# Altium footprint library EMX4T2R.PcbLib: 3 footprints
Each footprint in its own frame and in the unit in brackets; x right, y up, seen from the top. Pads: shape width x height; smd on the part's side, far side on the other; paste and mask are expansions set on the pad; w line width, h text height; cw(c..) or ccw(c..) is an arc to the next point about the centre after c.
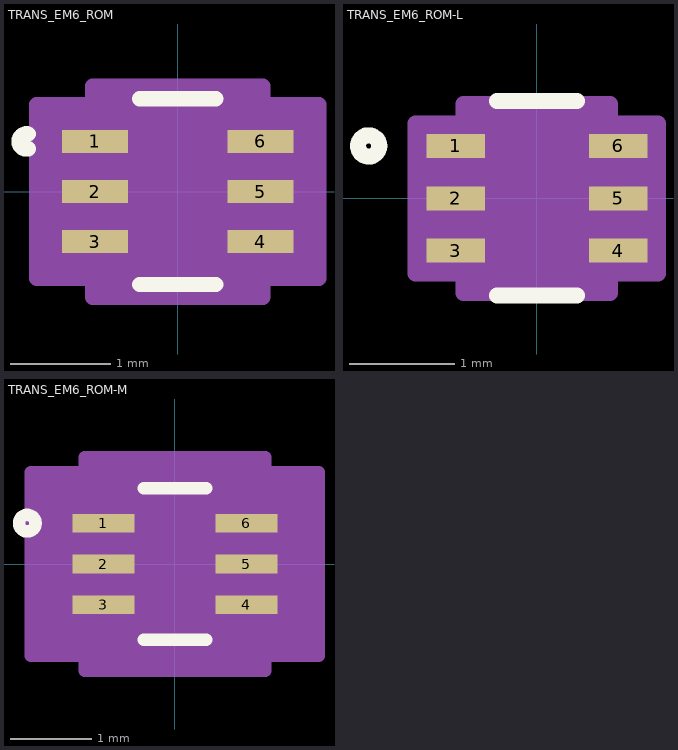
[diagram p0: the footprints below, top view; thin cyan lines are the x and y axes]

## TRANS_EM6_ROM [mil]
pads (6):
  rect 26x9 smd paste+0 mask+0: 1(-32.5,19.68) 2(-32.5,0) 3(-32.5,-19.68) 4(32.5,-19.68) 5(32.5,0) 6(32.5,19.68)
Top Overlay:
  lines w6: -58.6,16.78 cw(c-59.34,19.68) -58.6,22.59 ; -15.03,-36.5 15.03,-36.5 ; -15.03,36.5 15.03,36.5
Mechanical 13:
  lines w1: -12,31.5 ccw(c0,31.5) 12,31.5 ; -23.5,-31.5 -23.5,31.5 23.5,31.5 23.5,-31.5 -23.5,-31.5
Mechanical 15:
  region: -33.5,-34.19 -55.5,-34.19 -55.5,34.19 -33.5,34.19 -33.5,41.5 33.5,41.5 33.5,34.19 55.5,34.19 55.5,-34.19 33.5,-34.19 33.5,-41.5 -33.5,-41.5
  lines w6: -55.5,-34.19 -33.5,-34.19 -33.5,-41.5 33.5,-41.5 33.5,-34.19 55.5,-34.19 55.5,34.19 33.5,34.19 33.5,41.5 -33.5,41.5 -33.5,34.19 -55.5,34.19 -55.5,-34.19
3D body "TRANS_EM6_ROM.step": height 22.09, standoff 0, extent -33.5,-31.5 33.5,31.5

## TRANS_EM6_ROM-L [mil]
pads (6):
  rect 22x9 smd paste+0 mask+0: 1(-30.5,19.68) 2(-30.5,0) 3(-30.5,-19.68) 4(30.5,-19.68) 5(30.5,0) 6(30.5,19.68)
Top Overlay:
  circle w6: c-63.19,19.68 r4
  lines w6: -15.03,-36.5 15.03,-36.5 ; -15.03,36.5 15.03,36.5
  text ".Designator" at -137.5,-25 h50
Mechanical 13:
  circle w1: c-19.5,19.68 r3
  lines w1: -12,31.5 ccw(c0,31.5) 12,31.5 ; -23.5,-31.5 23.5,-31.5 23.5,31.5 -23.5,31.5 -23.5,-31.5
  text ".Designator" at -137.5,-25 h50
Mechanical 15:
  region: -27.5,-28.18 -45.5,-28.18 -45.5,28.18 -27.5,28.18 -27.5,35.5 27.5,35.5 27.5,28.18 45.5,28.18 45.5,-28.18 27.5,-28.18 27.5,-35.5 -27.5,-35.5
  lines w6: -45.5,-28.18 -45.5,28.18 -27.5,28.18 -27.5,35.5 27.5,35.5 27.5,28.18 45.5,28.18 45.5,-28.18 27.5,-28.18 27.5,-35.5 -27.5,-35.5 -27.5,-28.18 -45.5,-28.18
3D body "TRANS_EM6_ROM.step": height 22.09, standoff 0, extent -33.5,-31.5 33.5,31.5

## TRANS_EM6_ROM-M [mil]
pads (6):
  rect 30x9 smd paste+0 mask+0: 1(-34.5,19.68) 2(-34.5,0) 3(-34.5,-19.68) 4(34.5,-19.68) 5(34.5,0) 6(34.5,19.68)
Top Overlay:
  circle w6: c-71.19,19.68 r4
  lines w6: -15.03,-36.5 15.03,-36.5 ; -15.03,36.5 15.03,36.5
  text ".Designator" at -137.5,-25 h50
Mechanical 13:
  circle w1: c-19.5,19.68 r3
  lines w1: -12,31.5 ccw(c0,31.5) 12,31.5 ; -23.5,-31.5 23.5,-31.5 23.5,31.5 -23.5,31.5 -23.5,-31.5
  text ".Designator" at -137.5,-25 h50
Mechanical 15:
  region: -43.5,-44.19 -69.5,-44.19 -69.5,44.19 -43.5,44.19 -43.5,51.5 43.5,51.5 43.5,44.19 69.5,44.19 69.5,-44.19 43.5,-44.19 43.5,-51.5 -43.5,-51.5
  lines w6: -69.5,-44.19 -69.5,44.19 -43.5,44.19 -43.5,51.5 43.5,51.5 43.5,44.19 69.5,44.19 69.5,-44.19 43.5,-44.19 43.5,-51.5 -43.5,-51.5 -43.5,-44.19 -69.5,-44.19
3D body "TRANS_EM6_ROM.step": height 22.09, standoff 0, extent -33.5,-31.5 33.5,31.5